# Altium schematic symbol library CRG0805F100K.SchLib: 1 symbol
Pins are listed as number, name and electrical type; pins without a type are passive.

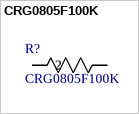
[diagram p0: symbol CRG0805F100K]

## CRG0805F100K
designator R?
CRG0805 1% 100K; Manufacturer_Name: TE Connectivity; Copyright: Copyright (C) 2026 Ultra Librarian. All rights reserved.; Manufacturer_Part_Number: CRG0805F100K; Datasheet: https://www.te.com/commerce/DocumentDelivery/DDEController?Action=srchrtrv&DocNm=1773204&DocType=Data+Sheet&DocLang=English&PartCntxt=1623095-1&DocFormat=pdf
footprint RES0805_CRG_TYCO_TYC
pins: 1, 2